# Altium footprint library Fred..PcbLib: 39 footprints (part 1 of 3)
Each footprint in its own frame and in the unit in brackets; x right, y up, seen from the top. Pads: shape width x height; smd on the part's side, far side on the other; paste and mask are expansions set on the pad; w line width, h text height; cw(c..) or ccw(c..) is an arc to the next point about the centre after c.
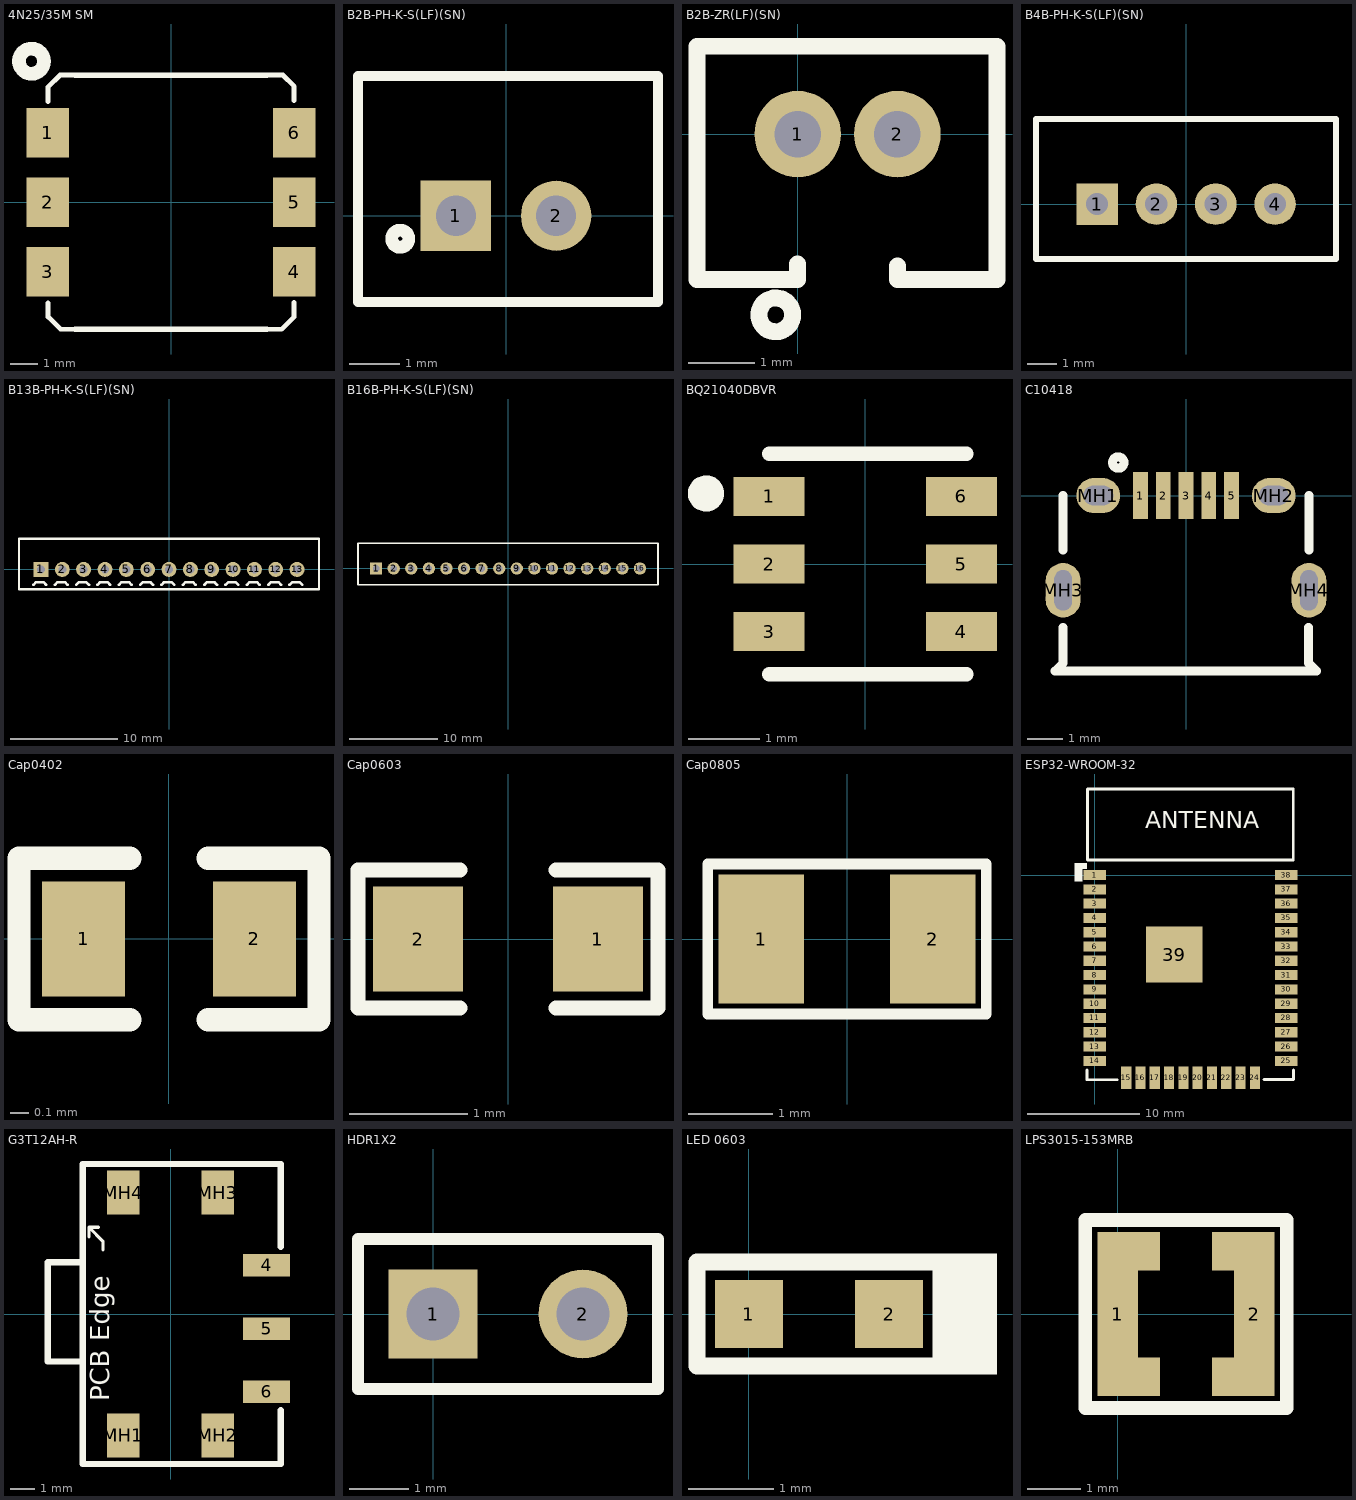
[diagram p0: the footprints below, top view; thin cyan lines are the x and y axes]

## 4N25/35M SM [mm] "4N25/35M SurfaceMount FP"
height 5
pads (6):
  rect 1.55x1.8 smd: 1(-4.505,2.54) 2(-4.505,0) 3(-4.505,-2.54) 4(4.505,-2.54) 5(4.505,0) 6(4.505,2.54)
Top Overlay:
  circle w0.5: c-5.105,5.156 r0.458
  lines w0.178: -4.505,3.683 -4.505,4.207 -4.064,4.648 -3.505,4.648 ; -4.497,-3.683 -4.497,-4.19 -4.041,-4.646 -3.505,-4.646 ; 3.495,-4.646 4.041,-4.646 4.487,-4.2 4.487,-3.658 ; 3.495,4.648 4.09,4.648 4.496,4.242 4.496,3.708
  lines w0.2: -3.505,-4.646 3.495,-4.646 ; -3.505,4.648 3.495,4.648
3D body "User Library-FAIRCHILD N06C_SMDIP-6.step": height 5.08, standoff 0, extent -4.95,-4.445 4.95,4.445

## B2B-PH-K-S(LF)(SN) [mm]
pads (2):
  rect 1.4x1.4 hole 0.8: 1(-1,0)
  round 1.4 hole 0.8: 2(1,0)
Top Overlay:
  circle w0.254: c-2.108,-0.457 r0.17
  lines w0.2: -2.95,-1.716 3.029,-1.716 3.029,2.784 -2.95,2.784 -2.95,-1.716
3D body "B2B-PH-K-S(LF)(SN)--3DModel-STEP-56544.STEP": height 6, standoff -3.4, extent -2.95,-1.716 2.95,2.784

## B2B-ZR(LF)(SN) [mm] "CONN HEADER VERT 2POS 1.5MM"
pads (2):
  round 1.3 hole 0.7: 1(0,0) 2(1.5,0)
Top Overlay:
  circle w0.254: c-0.33,-2.718 r0.254
  lines w0.254: 0,-1.956 0,-2.184 -1.513,-2.184 -1.513,1.321 2.997,1.321 2.997,-2.184 1.5,-2.184 1.5,-1.981
3D body "User Library-B2B-ZR(LF)(SN).step": height 4.5, standoff -2.7, extent -1.513,-2.182 2.987,1.318

## B4B-PH-K-S(LF)(SN) [mm]
pads (4):
  rect 1.4x1.4 hole 0.75: 1(-3,0)
  round 1.4 hole 0.75: 2(-1,0) 3(1,0) 4(3,0)
Top Overlay:
  lines w0.2: -5.057,-1.854 5.055,-1.854 5.055,2.87 -5.057,2.87 -5.057,-1.854

## B13B-PH-K-S(LF)(SN) [mm]
pads (13):
  rect 1.4x1.4 hole 0.75: 1(-12,0)
  round 1.4 hole 0.75: 2(-10,0) 3(-8,0) 4(-6,0) 5(-4,0) 6(-2,0) 7(0,0) 8(2,0) 9(4,0) 10(6,0) 11(8,0) 12(10,0) 13(12,0)
Top Overlay:
  lines w0.2: -14.057,-1.854 -14.057,2.87 14.055,2.87 14.055,-1.854 -14.057,-1.854
  lines w0.254: -12.7,-1.448 -12.446,-1.194 -11.76,-1.194 -11.506,-1.448 ; -10.7,-1.448 -10.446,-1.194 -9.76,-1.194 -9.506,-1.448 ; -8.7,-1.448 -8.446,-1.194 -7.76,-1.194 -7.506,-1.448 ; -6.7,-1.448 -6.446,-1.194 -5.76,-1.194 -5.506,-1.448 ; -4.7,-1.448 -4.446,-1.194 -3.76,-1.194 -3.506,-1.448 ; -2.7,-1.448 -2.446,-1.194 -1.76,-1.194 -1.506,-1.448 ; -0.7,-1.448 -0.446,-1.194 0.24,-1.194 0.494,-1.448 ; 1.3,-1.448 1.554,-1.194 2.24,-1.194 2.494,-1.448 ; 3.3,-1.448 3.554,-1.194 4.24,-1.194 4.494,-1.448 ; 5.3,-1.448 5.554,-1.194 6.24,-1.194 6.494,-1.448 ; 7.3,-1.448 7.554,-1.194 8.24,-1.194 8.494,-1.448 ; 9.3,-1.448 9.554,-1.194 10.24,-1.194 10.494,-1.448 ; 11.3,-1.448 11.554,-1.194 12.24,-1.194 12.494,-1.448
3D body "c-1-440054-3-f4-3d.stp": height 6, standoff -3.45, extent -14,-1.75 14,2.95

## B16B-PH-K-S(LF)(SN) [mm] "CONN HEADER VERT 16POS 2MM"
pads (16):
  rect 1.4x1.4 hole 0.75: 1(-15,0)
  round 1.4 hole 0.75: 2(-13,0) 3(-11,0) 4(-9,0) 5(-7,0) 6(-5,0) 7(-3,0) 8(-1,0) 9(1,0) 10(3,0) 11(5,0) 12(7,0) 13(9,0) 14(11,0) 15(13,0) 16(15,0)
Top Overlay:
  lines w0.2: -17.057,-1.854 -17.057,2.87 17.055,2.87 17.055,2.819 17.055,-1.854 -17.057,-1.854
3D body "con_header_vert_16pos_2mm.stp": height 6, standoff -3.4, extent -16.95,-1.716 16.95,2.784

## BQ21040DBVR [mm]
pads (6):
  rect 1x0.55 smd: 1(-1.35,0.95) 2(-1.35,0) 3(-1.35,-0.95) 4(1.35,-0.95) 5(1.35,0) 6(1.35,0.95)
Top Overlay:
  circle w0.254: c-2.235,0.991 r0.127
  lines w0.2: -1.346,-1.549 1.422,-1.549 ; -1.346,1.549 1.422,1.549
3D body "User Library-SOT23-6-2.step": height 1.37, standoff -0.08, extent -1.349,-1.45 1.451,1.45

## C10418 [mm] "USB - Micro B Female USB 2 5 SMD USB Connectors RoHS"
pads (9):
  rect 0.42x1.35 smd: 1(-1.3,0) 2(-0.65,0) 3(0,0) 4(0.65,0) 5(1.3,0)
  oval 1.25x1 hole 0.55 slot 0.85 at 0 deg: MH1(-2.5,0) MH2(2.5,0)
  oval 1x1.55 hole 0.5 slot 1.15 at 90 deg: MH3(-3.5,-2.7) MH4(3.5,-2.7)
Top Overlay:
  circle w0.254: c-1.93,0.94 r0.163
  lines w0.254: -3.505,-3.765 -3.505,-4.765 -3.505,-4.775 -3.734,-5.004 3.723,-5.004 3.495,-4.775 ; -3.505,-1.549 -3.505,0 ; 3.495,-4.765 3.495,-3.765 ; 3.505,-1.549 3.505,0
3D body "10118194c.stp": height 2.72, standoff -0.55, extent -4.025,-5.385 4.025,0.195
3D body: height 0.25, standoff 0, extent -7.671,-3.81 -7.671,-3.81

## Cap0402 [mil]
pads (2):
  rect 18x25 smd: 1(-18.5,0) 2(18.5,0)
Top Overlay:
  lines w5: -8.5,-17.5 -32.5,-17.5 -32.5,17.5 -8.5,17.5 ; 8.5,-17.5 32.5,-17.5 32.5,17.5 8.5,17.5
3D body "User Library-Capacitor 0402.step": height 18.5, standoff -1.18, extent -19.68,-9.84 19.7,9.85

## Cap0603 [mil]
pads (2):
  rect 30x35 smd: 1(30,0) 2(-30,0)
Top Overlay:
  lines w5: -16,-23 -50,-23 -50,23 -16,23 ; 16,-23 50,-23 50,23 16,23
3D body "User Library-CAPC1608X09.step": height 34.25, standoff -1.18, extent -31.49,-15.74 31.51,15.76

## Cap0805 [mil] "SMD 0805"
pads (2):
  rect 40x60 smd: 1(-40,0) 2(40,0)
Top Overlay:
  lines w5: -65,-35 -65,35 65,35 65,-35 -65,-35
3D body "User Library-0805 SMD Capacitor.step": height 30, standoff -0.79, extent -39.36,-24.6 39.38,24.61

## ESP32-WROOM-32 [mm] "SMD MODULE, ESP32-D0WDQ6, 32MBIT"
pads (39):
  rect 2x0.9 smd: 1(0,0) 2(0,-1.27) 3(0,-2.54) 4(0,-3.81) 5(0,-5.08) 6(0,-6.35) 7(0,-7.62) 8(0,-8.89) 9(0,-10.16) 10(0,-11.43) 11(0,-12.7) 12(0,-13.97) 13(0,-15.24) 14(0,-16.51)
  rect 0.9x2 smd: 15(2.785,-18.01) 16(4.055,-18.01) 17(5.325,-18.01) 18(6.595,-18.01) 19(7.865,-18.01) 20(9.135,-18.01) 21(10.405,-18.01) 22(11.675,-18.01) 23(12.945,-18.01) 24(14.215,-18.01)
  rect 2x0.9 smd paste+0: 25(17,-16.51) 26(17,-15.24) 27(17,-13.97) 28(17,-12.7) 29(17,-11.43) 30(17,-10.16) 31(17,-8.89) 32(17,-7.62) 33(17,-6.35) 34(17,-5.08) 35(17,-3.81) 36(17,-2.54) 37(17,-1.27) 38(17,0)
  rect 5x5 smd: 39(7.061,-7.061)
Top Overlay:
  rectangle: -1.397,0.559 -0.686,1.092
  rectangle: -1.803,-0.584 -1.118,1.092
  lines w0.254: -0.686,-17.323 -0.686,-18.186 1.981,-18.186 ; 15.037,-18.161 17.635,-18.161 17.635,-17.323 ; 17.628,7.645 -0.66,7.645 -0.66,1.346 17.628,1.346 17.628,7.646
  text "ANTENNA" at 4.496,4.166 h1.52
3D body "ESP32-WROOM-32D--3DModel-STEP-56544.STEP": height 3.25, standoff 0, extent -0.516,-18.009 17.484,7.491

## G3T12AH-R [mm] "Toggle Switch SPDT Surface Mount, Right Angle 0.4VA 28V"
pads (7):
  rect 1.9x0.9 smd: 4(3.85,1.956) 5(3.85,-0.584) 6(3.85,-3.124)
  rect 1.3x1.75 smd: MH1(-1.9,-4.875) MH2(1.9,-4.875) MH3(1.9,4.875) MH4(-1.9,4.875)
Top Overlay:
  lines w0.127: -3.277,3.099 -3.277,3.48 ; -2.896,3.48 -3.277,3.48 ; -2.718,2.565 -2.718,2.921 -3.277,3.48
  lines w0.254: -3.531,-1.905 -4.928,-1.905 -4.928,2.083 -3.531,2.083 ; -3.531,6.02 -3.531,-6.02 4.42,-6.02 4.42,-3.861 ; -3.505,6.02 4.42,6.02 4.42,4.851 4.42,2.692
  text "PCB Edge" at -2.464,-3.505 h0.76
3D body "G3T12AH.stp": height 5.49, standoff -0.08, extent -8.979,-5.474 4.42,5.524

## HDR1X2 [mm] "Connector; Header; 2 Position"
pads (2):
  rect 1.5x1.5 hole 0.9: 1(0,0)
  round 1.5 hole 0.9: 2(2.54,0)
Top Overlay:
  lines w0.2: -1.27,-1.27 3.81,-1.27 3.81,1.27 -1.27,1.27 -1.27,-1.27
3D body "User Library-1x2 TH Pitch 2_54mm.STEP": height 9.5, standoff -3.2, extent -1.245,-1.321 3.835,1.219

## LED 0603 [mm] "LED BLUE CLEAR CHIP SMD"
pads (2):
  rect 0.8x0.8 smd: 1(0,0) 2(1.65,0)
Top Overlay:
  region: 2.921,0.711 2.261,0.711 2.261,-0.711 2.921,-0.711
  lines w0.2: -0.61,-0.61 -0.61,0.61 2.261,0.61 2.261,-0.61 -0.61,-0.61
3D body "User Library-LED SMD0603.step": height 0.65, standoff -0.03, extent 0.013,-0.369 1.663,0.356

## LPS3015-153MRB [mm] "Fixed Inductors LPS3015 AEC-Q200 15uH SMD"
pads (6):
  rect 0.76x3.05 smd: 1(0,0) 2(2.54,0)
  rect 1.16x0.72 smd: ""(0.203,-1.168) ""(0.203,1.168) ""(2.337,-1.168) ""(2.337,1.168)
Top Overlay:
  lines w0.254: -0.61,-1.753 3.15,-1.753 3.15,1.753 -0.61,1.753 -0.61,-1.753
3D body "Coilcraft-LPS3015.step": height 1.49, standoff -0.01, extent -0.245,-1.515 2.785,1.515